# EAGLE library part IC_BUFF_74LVC1T45 (library dp_devices.v6)
74LVC1T45 Dual supply translating transceiver; 3-state
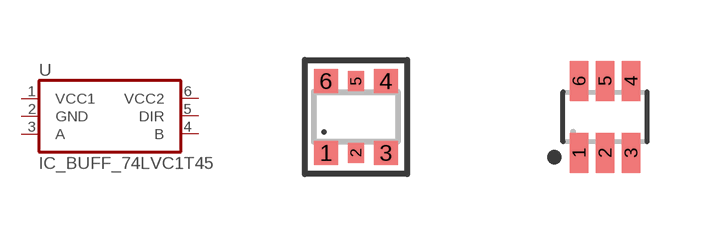
[diagram p199: symbol with the pads of SOT-363; footprints SOT-363, SC-70-6]

Designator prefix U

## IC_BUFF_74LVC1T45  [SOT-363]
1  VCC1  pwr
2  GND  pwr
3  A  in
4  B  out
5  DIR  in
6  VCC2  pwr

## IC_BUFF_74LVC1T45-SC-70-6  [SC-70-6]
Pads as for SOT-363

## Footprint SOT-363 (pad centres in mm)
smd 0.6 x 0.6: 1 -0.75,-0.9; 3 0.75,-0.9; 4 0.75,0.9; 6 -0.75,0.9
smd 0.4 x 0.5: 2 0,-0.9; 5 0,0.9

## Footprint SC-70-6 (pad centres in mm)
smd 0.47 x 1: 1 -0.65,-0.9; 2 0,-0.9; 3 0.65,-0.9; 4 0.65,0.9; 5 0,0.9; 6 -0.65,0.9